# Altium schematic symbol library QuarterBridge_verL.SchLib: 12 symbols
Pins are listed as number, name and electrical type; pins without a type are passive.

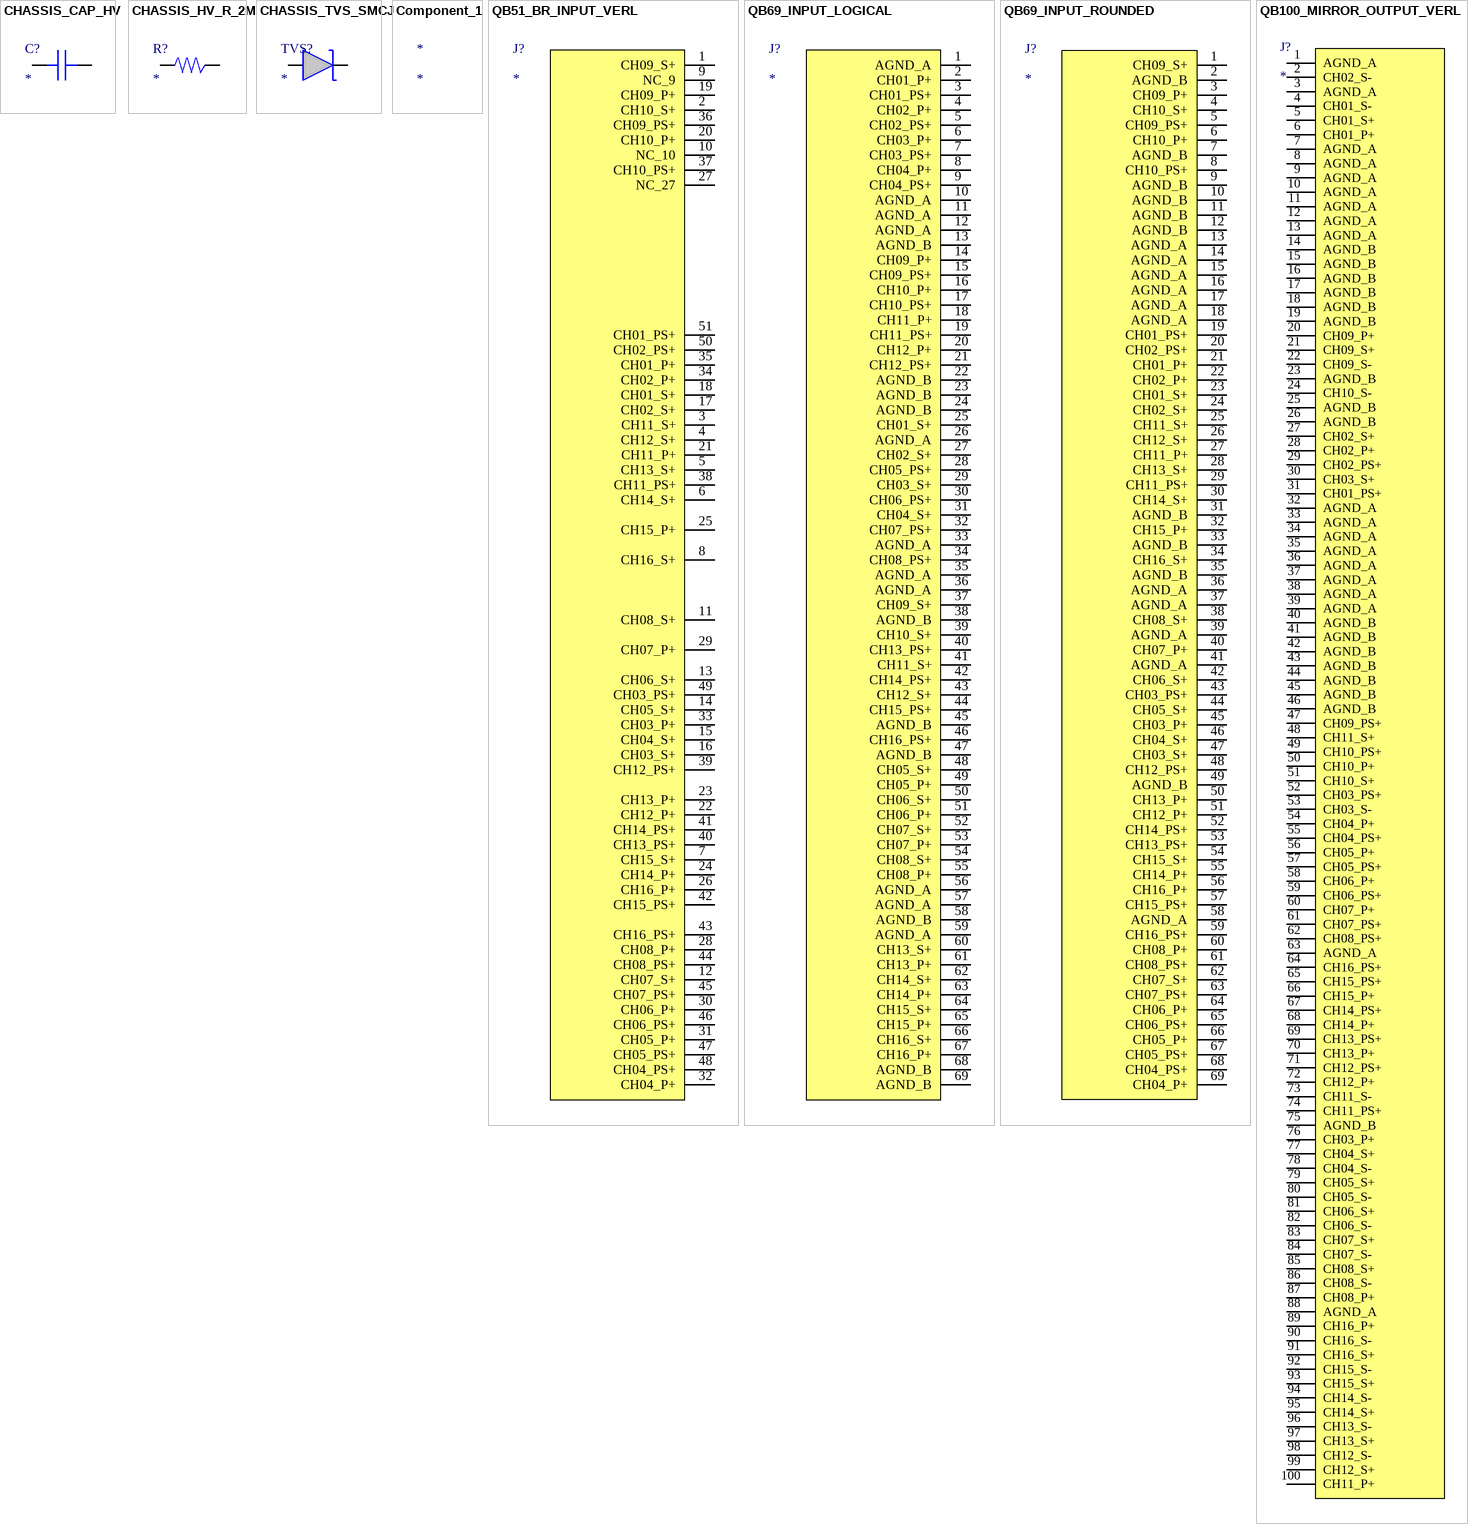
[diagram p0: symbols CHASSIS_CAP_HV to QB100_MIRROR_OUTPUT_VERL]

## CHASSIS_CAP_HV
designator C?
footprint QB_CHASSIS_C1206_X7R_2KV
pins: 1, 2

## CHASSIS_HV_R_2M
designator R?
2Mohm >=2kV bridge resistor; part, power/pulse rating and footprint pending
footprint QB_CHASSIS_R2010_HV
pins: 1, 2

## CHASSIS_TVS_SMCJ
designator TVS?
footprint QB_CHASSIS_SMC_AK
pins: 1 A, 2 K

## Component_1
designator *

## QB51_BR_INPUT_VERL
designator J?
Auto planar assignment; physical CBR PIN footprint unchanged
footprint QB51_BR_PIN_VERL
pins: 1 CH09_S+, 2 CH10_S+, 3 CH11_S+, 4 CH12_S+, 5 CH13_S+, 6 CH14_S+, 7 CH15_S+, 8 CH16_S+, 9 NC_9, 10 NC_10, 11 CH08_S+, 12 CH07_S+, 13 CH06_S+, 14 CH05_S+, 15 CH04_S+, 16 CH03_S+, 17 CH02_S+, 18 CH01_S+, 19 CH09_P+, 20 CH10_P+, 21 CH11_P+, 22 CH12_P+, 23 CH13_P+, 24 CH14_P+, 25 CH15_P+, 26 CH16_P+, 27 NC_27, 28 CH08_P+, 29 CH07_P+, 30 CH06_P+, 31 CH05_P+, 32 CH04_P+, 33 CH03_P+, 34 CH02_P+, 35 CH01_P+, 36 CH09_PS+, 37 CH10_PS+, 38 CH11_PS+, 39 CH12_PS+, 40 CH13_PS+, 41 CH14_PS+, 42 CH15_PS+, 43 CH16_PS+, 44 CH08_PS+, 45 CH07_PS+, 46 CH06_PS+, 47 CH05_PS+, 48 CH04_PS+, 49 CH03_PS+, 50 CH02_PS+, 51 CH01_PS+

## QB69_INPUT_LOGICAL
designator J?
69-pin revision logical pinout; physical model requires gender/view confirmation
footprint QB69_CBR69_PIN_R2
pins: 1 AGND_A, 2 CH01_P+, 3 CH01_PS+, 4 CH02_P+, 5 CH02_PS+, 6 CH03_P+, 7 CH03_PS+, 8 CH04_P+, 9 CH04_PS+, 10 AGND_A, 11 AGND_A, 12 AGND_A, 13 AGND_B, 14 CH09_P+, 15 CH09_PS+, 16 CH10_P+, 17 CH10_PS+, 18 CH11_P+, 19 CH11_PS+, 20 CH12_P+, 21 CH12_PS+, 22 AGND_B, 23 AGND_B, 24 AGND_B, 25 CH01_S+, 26 AGND_A, 27 CH02_S+, 28 CH05_PS+, 29 CH03_S+, 30 CH06_PS+, 31 CH04_S+, 32 CH07_PS+, 33 AGND_A, 34 CH08_PS+, 35 AGND_A, 36 AGND_A, 37 CH09_S+, 38 AGND_B, 39 CH10_S+, 40 CH13_PS+, 41 CH11_S+, 42 CH14_PS+, 43 CH12_S+, 44 CH15_PS+, 45 AGND_B, 46 CH16_PS+, 47 AGND_B, 48 CH05_S+, 49 CH05_P+, 50 CH06_S+, 51 CH06_P+, 52 CH07_S+, 53 CH07_P+, 54 CH08_S+, 55 CH08_P+, 56 AGND_A, 57 AGND_A, 58 AGND_B, 59 AGND_A, 60 CH13_S+, 61 CH13_P+, 62 CH14_S+, 63 CH14_P+, 64 CH15_S+, 65 CH15_P+, 66 CH16_S+, 67 CH16_P+, 68 AGND_B, 69 AGND_B

## QB69_INPUT_ROUNDED
designator J?
Auto planar assignment; physical CBR PIN footprint unchanged
pins: 1 CH09_S+, 2 AGND_B, 3 CH09_P+, 4 CH10_S+, 5 CH09_PS+, 6 CH10_P+, 7 AGND_B, 8 CH10_PS+, 9 AGND_B, 10 AGND_B, 11 AGND_B, 12 AGND_B, 13 AGND_A, 14 AGND_A, 15 AGND_A, 16 AGND_A, 17 AGND_A, 18 AGND_A, 19 CH01_PS+, 20 CH02_PS+, 21 CH01_P+, 22 CH02_P+, 23 CH01_S+, 24 CH02_S+, 25 CH11_S+, 26 CH12_S+, 27 CH11_P+, 28 CH13_S+, 29 CH11_PS+, 30 CH14_S+, 31 AGND_B, 32 CH15_P+, 33 AGND_B, 34 CH16_S+, 35 AGND_B, 36 AGND_A, 37 AGND_A, 38 CH08_S+, 39 AGND_A, 40 CH07_P+, 41 AGND_A, 42 CH06_S+, 43 CH03_PS+, 44 CH05_S+, 45 CH03_P+, 46 CH04_S+, 47 CH03_S+, 48 CH12_PS+, 49 AGND_B, 50 CH13_P+, 51 CH12_P+, 52 CH14_PS+, 53 CH13_PS+, 54 CH15_S+, 55 CH14_P+, 56 CH16_P+, 57 CH15_PS+, 58 AGND_A, 59 CH16_PS+, 60 CH08_P+, 61 CH08_PS+, 62 CH07_S+, 63 CH07_PS+, 64 CH06_P+, 65 CH06_PS+, 66 CH05_P+, 67 CH05_PS+, 68 CH04_PS+, 69 CH04_P+

## QB100_MIRROR_OUTPUT_VERL
designator J?
Auto planar assignment; physical CBR PIN footprint unchanged
footprint QB69_CBR100_PIN_R1
pins: 1 AGND_A, 2 CH02_S-, 3 AGND_A, 4 CH01_S-, 5 CH01_S+, 6 CH01_P+, 7 AGND_A, 8 AGND_A, 9 AGND_A, 10 AGND_A, 11 AGND_A, 12 AGND_A, 13 AGND_A, 14 AGND_B, 15 AGND_B, 16 AGND_B, 17 AGND_B, 18 AGND_B, 19 AGND_B, 20 CH09_P+, 21 CH09_S+, 22 CH09_S-, 23 AGND_B, 24 CH10_S-, 25 AGND_B, 26 AGND_B, 27 CH02_S+, 28 CH02_P+, 29 CH02_PS+, 30 CH03_S+, 31 CH01_PS+, 32 AGND_A, 33 AGND_A, 34 AGND_A, 35 AGND_A, 36 AGND_A, 37 AGND_A, 38 AGND_A, 39 AGND_A, 40 AGND_B, 41 AGND_B, 42 AGND_B, 43 AGND_B, 44 AGND_B, 45 AGND_B, 46 AGND_B, 47 CH09_PS+, 48 CH11_S+, 49 CH10_PS+, 50 CH10_P+, 51 CH10_S+, 52 CH03_PS+, 53 CH03_S-, 54 CH04_P+, 55 CH04_PS+, 56 CH05_P+, 57 CH05_PS+, 58 CH06_P+, 59 CH06_PS+, 60 CH07_P+, 61 CH07_PS+, 62 CH08_PS+, 63 AGND_A, 64 CH16_PS+, 65 CH15_PS+, 66 CH15_P+, 67 CH14_PS+, 68 CH14_P+, 69 CH13_PS+, 70 CH13_P+, 71 CH12_PS+, 72 CH12_P+, 73 CH11_S-, 74 CH11_PS+, 75 AGND_B, 76 CH03_P+, 77 CH04_S+, 78 CH04_S-, 79 CH05_S+, 80 CH05_S-, 81 CH06_S+, 82 CH06_S-, 83 CH07_S+, 84 CH07_S-, 85 CH08_S+, 86 CH08_S-, 87 CH08_P+, 88 AGND_A, 89 CH16_P+, 90 CH16_S-, 91 CH16_S+, 92 CH15_S-, 93 CH15_S+, 94 CH14_S-, 95 CH14_S+, 96 CH13_S-, 97 CH13_S+, 98 CH12_S-, 99 CH12_S+, 100 CH11_P+

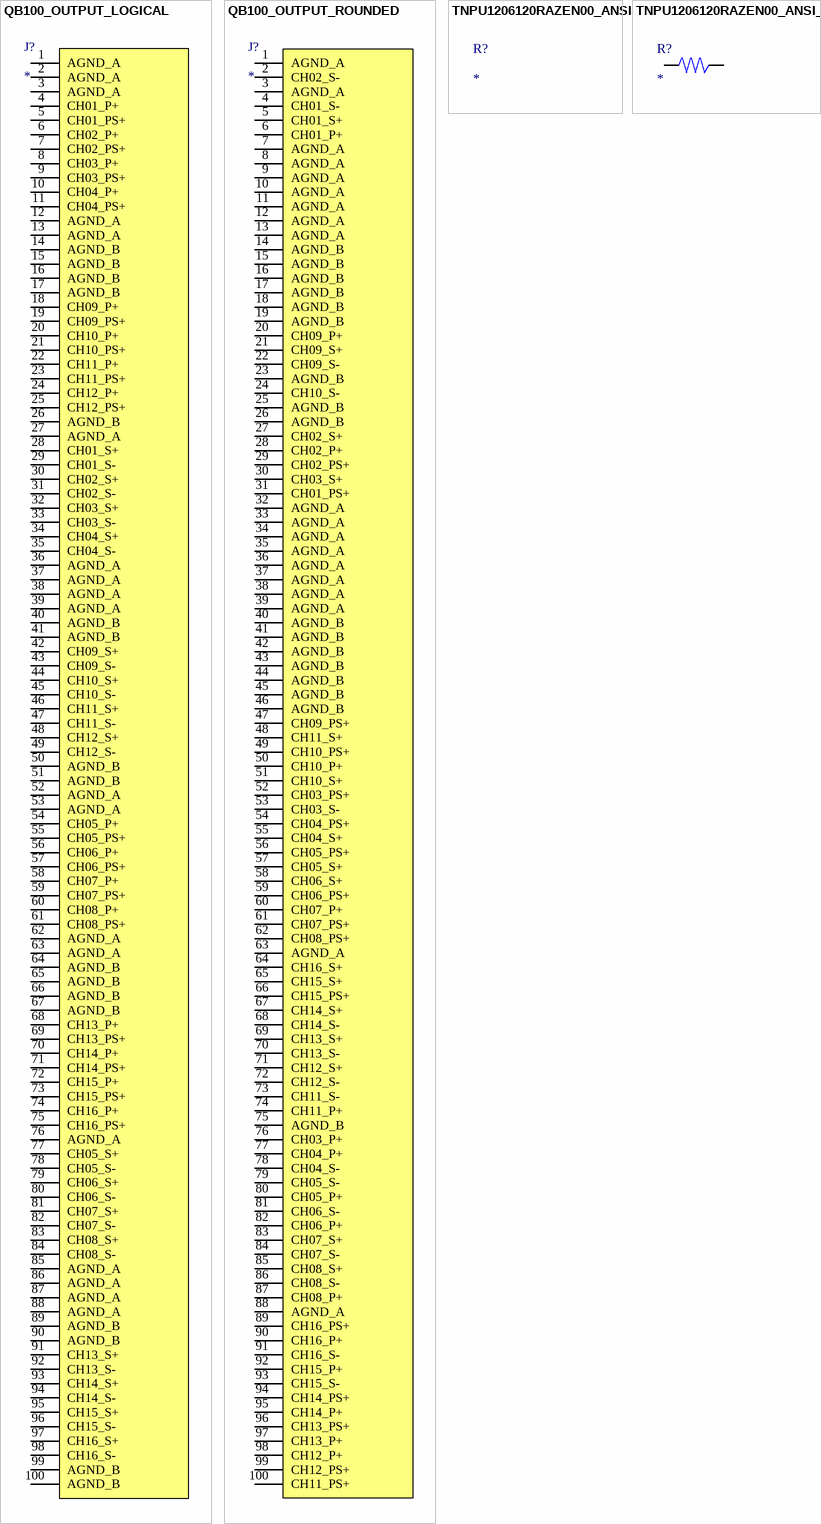
[diagram p1: symbols QB100_OUTPUT_LOGICAL to TNPU1206120RAZEN00_ANSI_1]

## QB100_OUTPUT_LOGICAL
designator J?
69-pin revision logical pinout; physical model requires gender/view confirmation
footprint QB69_CBR100_PIN_R1
pins: 1 AGND_A, 2 AGND_A, 3 AGND_A, 4 CH01_P+, 5 CH01_PS+, 6 CH02_P+, 7 CH02_PS+, 8 CH03_P+, 9 CH03_PS+, 10 CH04_P+, 11 CH04_PS+, 12 AGND_A, 13 AGND_A, 14 AGND_B, 15 AGND_B, 16 AGND_B, 17 AGND_B, 18 CH09_P+, 19 CH09_PS+, 20 CH10_P+, 21 CH10_PS+, 22 CH11_P+, 23 CH11_PS+, 24 CH12_P+, 25 CH12_PS+, 26 AGND_B, 27 AGND_A, 28 CH01_S+, 29 CH01_S-, 30 CH02_S+, 31 CH02_S-, 32 CH03_S+, 33 CH03_S-, 34 CH04_S+, 35 CH04_S-, 36 AGND_A, 37 AGND_A, 38 AGND_A, 39 AGND_A, 40 AGND_B, 41 AGND_B, 42 CH09_S+, 43 CH09_S-, 44 CH10_S+, 45 CH10_S-, 46 CH11_S+, 47 CH11_S-, 48 CH12_S+, 49 CH12_S-, 50 AGND_B, 51 AGND_B, 52 AGND_A, 53 AGND_A, 54 CH05_P+, 55 CH05_PS+, 56 CH06_P+, 57 CH06_PS+, 58 CH07_P+, 59 CH07_PS+, 60 CH08_P+, 61 CH08_PS+, 62 AGND_A, 63 AGND_A, 64 AGND_B, 65 AGND_B, 66 AGND_B, 67 AGND_B, 68 CH13_P+, 69 CH13_PS+, 70 CH14_P+, 71 CH14_PS+, 72 CH15_P+, 73 CH15_PS+, 74 CH16_P+, 75 CH16_PS+, 76 AGND_A, 77 CH05_S+, 78 CH05_S-, 79 CH06_S+, 80 CH06_S-, 81 CH07_S+, 82 CH07_S-, 83 CH08_S+, 84 CH08_S-, 85 AGND_A, 86 AGND_A, 87 AGND_A, 88 AGND_A, 89 AGND_B, 90 AGND_B, 91 CH13_S+, 92 CH13_S-, 93 CH14_S+, 94 CH14_S-, 95 CH15_S+, 96 CH15_S-, 97 CH16_S+, 98 CH16_S-, 99 AGND_B, 100 AGND_B

## QB100_OUTPUT_ROUNDED
designator J?
Auto planar assignment; physical CBR PIN footprint unchanged
pins: 1 AGND_A, 2 CH02_S-, 3 AGND_A, 4 CH01_S-, 5 CH01_S+, 6 CH01_P+, 7 AGND_A, 8 AGND_A, 9 AGND_A, 10 AGND_A, 11 AGND_A, 12 AGND_A, 13 AGND_A, 14 AGND_B, 15 AGND_B, 16 AGND_B, 17 AGND_B, 18 AGND_B, 19 AGND_B, 20 CH09_P+, 21 CH09_S+, 22 CH09_S-, 23 AGND_B, 24 CH10_S-, 25 AGND_B, 26 AGND_B, 27 CH02_S+, 28 CH02_P+, 29 CH02_PS+, 30 CH03_S+, 31 CH01_PS+, 32 AGND_A, 33 AGND_A, 34 AGND_A, 35 AGND_A, 36 AGND_A, 37 AGND_A, 38 AGND_A, 39 AGND_A, 40 AGND_B, 41 AGND_B, 42 AGND_B, 43 AGND_B, 44 AGND_B, 45 AGND_B, 46 AGND_B, 47 CH09_PS+, 48 CH11_S+, 49 CH10_PS+, 50 CH10_P+, 51 CH10_S+, 52 CH03_PS+, 53 CH03_S-, 54 CH04_PS+, 55 CH04_S+, 56 CH05_PS+, 57 CH05_S+, 58 CH06_S+, 59 CH06_PS+, 60 CH07_P+, 61 CH07_PS+, 62 CH08_PS+, 63 AGND_A, 64 CH16_S+, 65 CH15_S+, 66 CH15_PS+, 67 CH14_S+, 68 CH14_S-, 69 CH13_S+, 70 CH13_S-, 71 CH12_S+, 72 CH12_S-, 73 CH11_S-, 74 CH11_P+, 75 AGND_B, 76 CH03_P+, 77 CH04_P+, 78 CH04_S-, 79 CH05_S-, 80 CH05_P+, 81 CH06_S-, 82 CH06_P+, 83 CH07_S+, 84 CH07_S-, 85 CH08_S+, 86 CH08_S-, 87 CH08_P+, 88 AGND_A, 89 CH16_PS+, 90 CH16_P+, 91 CH16_S-, 92 CH15_P+, 93 CH15_S-, 94 CH14_PS+, 95 CH14_P+, 96 CH13_PS+, 97 CH13_P+, 98 CH12_P+, 99 CH12_PS+, 100 CH11_PS+

## TNPU1206120RAZEN00_ANSI
designator R?
Vishay TNPU1206120RAZEN00; 120 ohm, 0.05%, 5ppm/K, 1206

## TNPU1206120RAZEN00_ANSI_1
designator R?
Vishay TNPU1206120RAZEN00; 120 ohm, 0.05%, 5ppm/K, 1206
footprint QB69_TNPU1206_R1
pins: 1, 2